# Altium footprint library PcbLib1.PcbLib: 7 footprints
Each footprint in its own frame and in the unit in brackets; x right, y up, seen from the top. Pads: shape width x height; smd on the part's side, far side on the other; paste and mask are expansions set on the pad; w line width, h text height; cw(c..) or ccw(c..) is an arc to the next point about the centre after c.
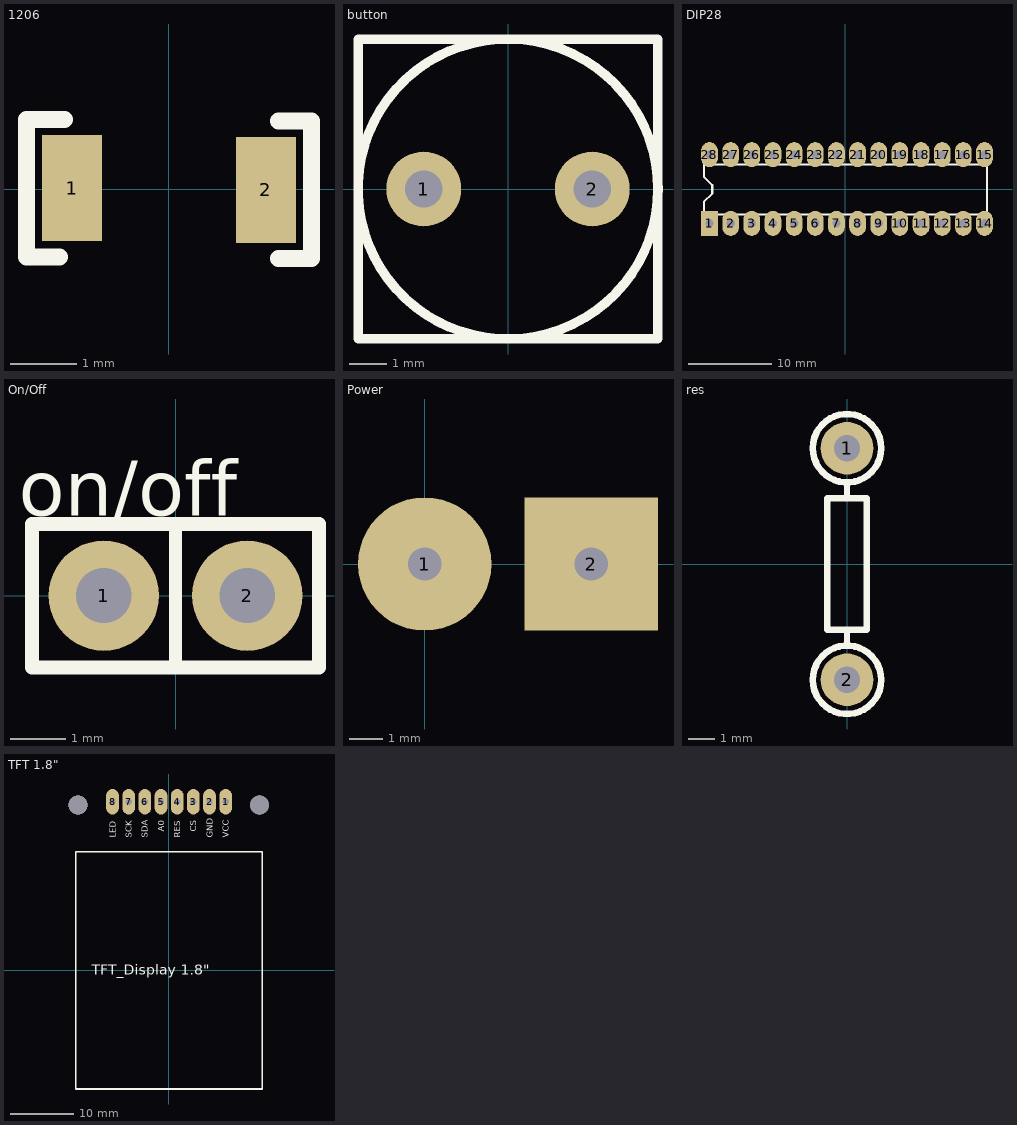
[diagram p0: the footprints below, top view; thin cyan lines are the x and y axes]

## 1206 [mm]
pads (2):
  rect 0.9x1.6 smd: 1(-1.462,0.013) 2(1.463,-0.012)
Top Overlay:
  lines w0.254: -2.15,-1.025 -1.65,-1.025 ; -2.15,-1 -2.15,1.05 -1.575,1.05 ; 1.65,-1.05 2.15,-1.05 2.15,1.025 1.65,1.025
3D body "1206 觐礓葛.x_b": height 1.61, standoff 0.01, extent -1.562,-0.737 1.538,0.763

## button [mm]
pads (2):
  round 2 hole 1: 1(-2.25,0) 2(2.25,0)
Top Overlay:
  circle w0.254: c0,0 r4.005
  lines w0.254: -4,-4 4,-4 4,4 -4,4 -4,-4

## DIP28 [mm]
pads (28):
  rect 2x3 hole 1: 1(-16.325,-4.075)
  oval 2x3 hole 1: 2(-13.785,-4.075) 3(-11.245,-4.075) 4(-8.705,-4.075) 5(-6.165,-4.075) 6(-3.625,-4.075) 7(-1.085,-4.075) 8(1.455,-4.075) 9(3.995,-4.075) 10(6.535,-4.075) 11(9.075,-4.075) 12(11.615,-4.075) 13(14.155,-4.075) 14(16.695,-4.075) 15(16.695,4.175) 16(14.155,4.175) 17(11.615,4.175) 18(9.075,4.175) 19(6.535,4.175) 20(3.995,4.175) 21(1.455,4.175) 22(-1.085,4.175) 23(-3.625,4.175) 24(-6.165,4.175) 25(-8.705,4.175) 26(-11.245,4.175) 27(-13.785,4.175) 28(-16.325,4.175)
Top Overlay:
  lines w0.254: -17,-3 17,-3 17,3 -17,3 -17,1.5 -16,0.5 -16,-0.5 -17,-1.5 -17,-3
3D body "ATMega328.SLDPRT": height 5.03, standoff -2.61, extent -17.27,-4.259 17.27,4.259

## On/Off [mm]
pads (2):
  round 2 hole 1: 1(-1.3,0) 2(1.3,0)
Top Overlay:
  lines w0.24: 0,-1.3 0,1.3
  lines w0.254: -2.6,-1.3 2.6,-1.3 2.6,1.3 -2.6,1.3 -2.6,-1.3
  text "on/off" at -2.836,1.446 h1

## Power [mm]
pads (2):
  round 4 hole 1: 1(0,0)
  rect 4x4 hole 1: 2(5,0)

## res [mm]
pads (2):
  round 2 hole 1: 1(0,4.4) 2(0,-4.4)
Top Overlay:
  circle w0.254: c0,4.4 r1.3
  circle w0.254: c0,-4.4 r1.3
  lines w0.24: 0,-3.1 0,-2.5 ; 0,2.5 0,3.1
  lines w0.254: -0.75,-2.5 0.75,-2.5 0.75,2.5 -0.75,2.5 -0.75,-2.5
3D body "Resistor.STEP": height 2.99, standoff -4, extent -1,-4.682 1,4.682

## TFT 1.8" [mm]
pads (8):
  oval 2x4 hole 1: 1(8.905,26.5) 2(6.365,26.5) 3(3.825,26.5) 4(1.285,26.5) 5(-1.255,26.5) 6(-3.795,26.5) 7(-6.335,26.5) 8(-8.875,26.5)
via 14.2,26 diameter 3 hole 3
via -14.3,26 diameter 3 hole 3
via -14.3,-26 diameter 3 hole 3
via 14.2,-26 diameter 3 hole 3
Top Overlay:
  lines w0.254: -14.662,-18.625 14.663,-18.625 14.663,18.625 -14.662,18.625 -14.662,-18.625
  text "VCC" at 9.38,20.867 h1
  text "GND" at 6.84,20.867 h1
  text "CS" at 4.3,21.767 h1
  text "RES" at 1.76,20.867 h1
  text "A0" at -0.78,21.767 h1
  text "SDA" at -3.32,20.867 h1
  text "SCK" at -5.86,20.867 h1
  text "LED" at -8.4,20.867 h1
  text "TFT_Display 1.8\"" at -12.129,-0.666 h1.6
3D body "AZ-Delivery 1.8 inch TFT Display SPI.stp": height 6.9, standoff -5.6, extent -17.25,-29.025 17.25,28.975